# Altium schematic symbol library B2B-ZR-3.4_LF__SN_.SchLib: 1 symbol
Pins are listed as number, name and electrical type; pins without a type are passive.

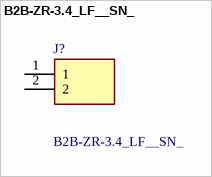
[diagram p0: symbol B2B-ZR-3.4_LF__SN_]

## B2B-ZR-3.4_LF__SN_
designator J?
CONN HEADER VERT 2POS 1.5MM; Manufacturer_Name: JST (JAPAN SOLDERLESS TERMINALS); Manufacturer_Part_Number: B2B-ZR-3.4(LF)(SN); Geometry.Height: 4.5mm; Mouser Part Number: 306-B2BZR3.4LFSN; Mouser Price/Stock: https://www.mouser.co.uk/ProductDetail/JST-Commercial/B2B-ZR-3.4LFSN?qs=cdbOS8ANM9C2HtZS%252BiY4WQ%3D%3D; Arrow Part Number: *; Arrow Price/Stock: *; Datasheet Link: http://www.jst-mfg.com/product/pdf/eng/eZH.pdf
footprint SHDR2W50P0X150_1X2_450X350X450P
pins: 1, 2